# Altium footprint library 1757242.PcbLib: 1 footprints
Each footprint in its own frame and in the unit in brackets; x right, y up, seen from the top. Pads: shape width x height; smd on the part's side, far side on the other; paste and mask are expansions set on the pad; w line width, h text height; cw(c..) or ccw(c..) is an arc to the next point about the centre after c.
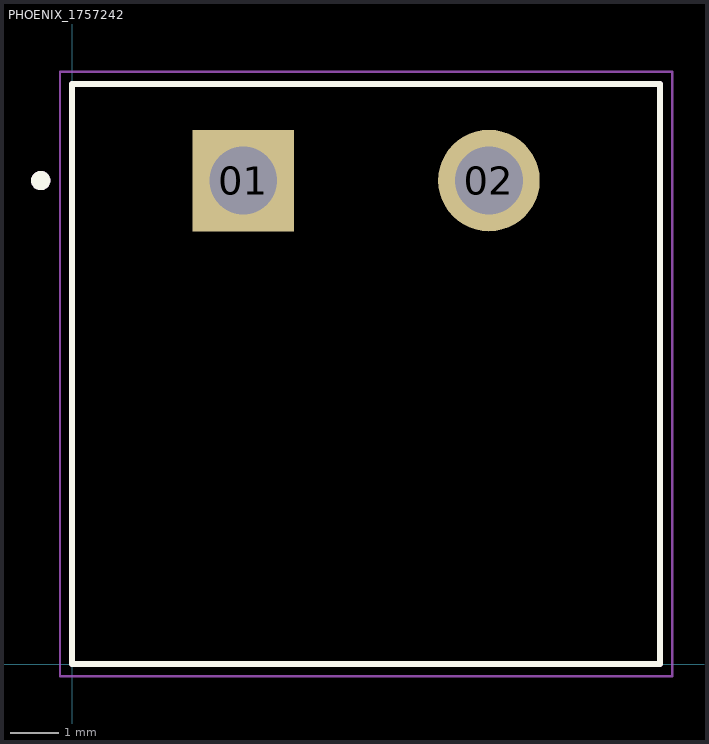
[diagram p0: the footprint, top view; thin cyan lines are the x and y axes]

## PHOENIX_1757242 [mm]
pads (2):
  rect 2.1x2.1 / inner round 2.1 / far side rect 2.1x2.1 hole 1.4: 01(3.54,10)
  round 2.1 hole 1.4: 02(8.62,10)
Top Overlay:
  circle w0.2: c-0.65,10 r0.1
  lines w0.127: 0,0 12.16,0 12.16,12 0,12 0,0
Mechanical 13:
  circle w0.2: c-0.65,10 r0.1
  lines w0.127: 0,0 12.16,0 12.16,12 0,12 0,0
Mechanical 15:
  lines w0.05: -0.25,-0.25 12.41,-0.25 12.41,12.25 -0.25,12.25 -0.25,-0.25
3D body "step_temp.STEP": height 8.6, standoff -3.5, extent -6.04,-6 6.04,6